# Altium footprint library Verdin Development Board.PcbLib: 154 footprints (part 8 of 10)
Each footprint in its own frame and in the unit in brackets; x right, y up, seen from the top. Pads: shape width x height; smd on the part's side, far side on the other; paste and mask are expansions set on the pad; w line width, h text height; cw(c..) or ccw(c..) is an arc to the next point about the centre after c.
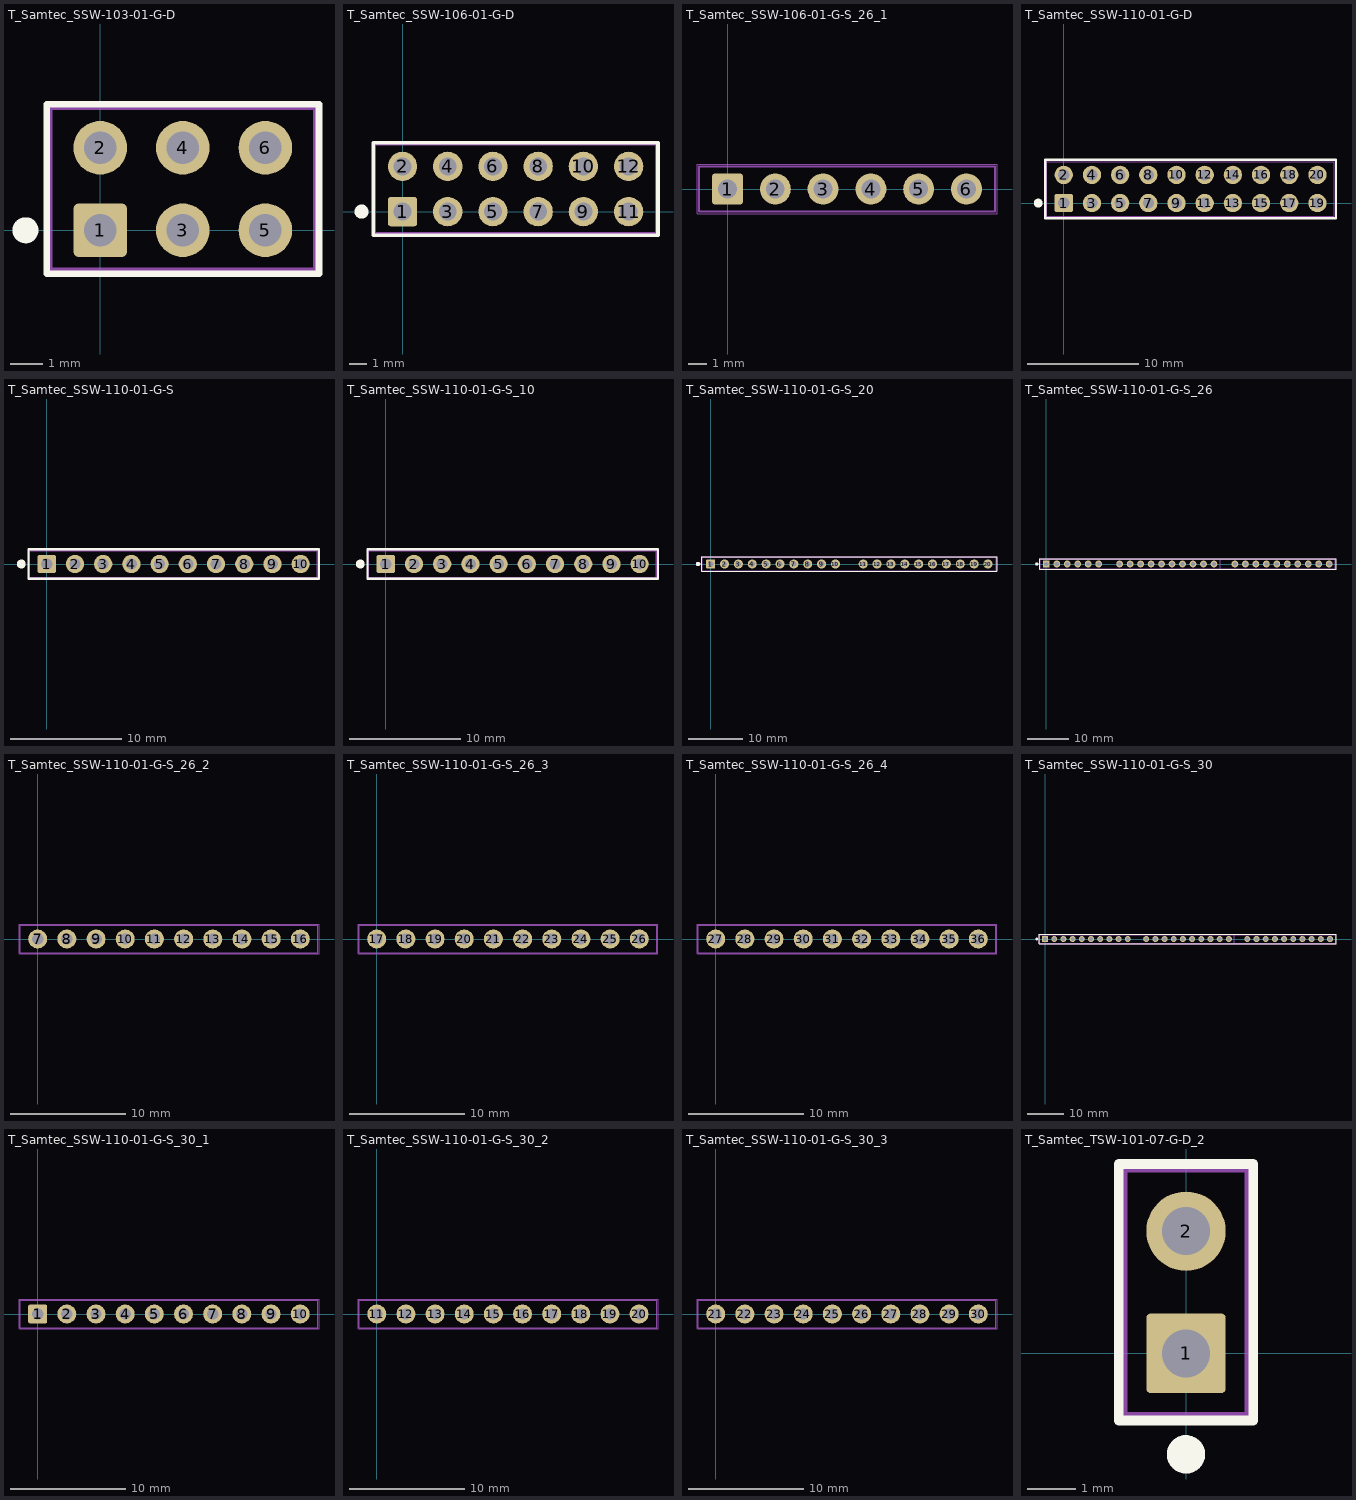
[diagram p7: the footprints below, top view; thin cyan lines are the x and y axes]

## T_Samtec_SSW-103-01-G-D [mm]
pads (6):
  rrect20% 1.65x1.65 hole 1: 1(0,0)
  round 1.65 hole 1: 2(0,2.54) 3(2.54,0) 4(2.54,2.54) 5(5.08,0) 6(5.08,2.54)
Top Overlay:
  circle w0.4: c-2.3,0 r0.2
  lines w0.2: -1.65,-1.33 6.73,-1.33 6.73,3.87 -1.65,3.87 -1.65,-1.33
Top Component Outline:
  lines w0.05: -1.625,-1.305 -1.625,3.845 6.705,3.845 6.705,-1.305 -1.625,-1.305
Top 3D Body:
  lines w0.001: -1.525,-1.205 -1.525,3.745 6.605,3.745 6.605,-1.205 -1.525,-1.205
Top Dimensions:
  lines w0.1: -1.525,-1.2 6.6,-1.2 6.6,3.75 -1.525,3.75 -1.525,-1.2
Top Component Center:
  circle w0.05: c0,0 r0.35
  lines w0.05: -0.5,0 0.5,0 ; 0,-0.5 0,0.5
Top Assembly:
  text ".Designator" at 0.875,4.225 h0.75
3D body "Samtec-SSW-103-01-G-D.step": height 8.52, standoff -2.63, extent -1.524,-1.206 6.604,3.747

## T_Samtec_SSW-106-01-G-D [mm]
pads (12):
  rrect20% 1.65x1.65 hole 1: 1(0,0)
  round 1.65 hole 1: 2(0,2.54) 3(2.54,0) 4(2.54,2.54) 5(5.08,0) 6(5.08,2.54) 7(7.62,0) 8(7.62,2.54) 9(10.16,0) 10(10.16,2.54) 11(12.7,0) 12(12.7,2.54)
Top Overlay:
  circle w0.4: c-2.3,0 r0.2
  lines w0.2: -1.65,-1.33 14.35,-1.33 14.35,3.87 -1.65,3.87 -1.65,-1.33
Top Component Outline:
  lines w0.05: -1.625,-1.305 -1.625,3.845 14.325,3.845 14.325,-1.305 -1.625,-1.305
Top 3D Body:
  lines w0.001: -1.525,-1.205 -1.525,3.745 14.225,3.745 14.225,-1.205 -1.525,-1.205
Top Dimensions:
  lines w0.1: -1.525,-1.2 -1.525,3.75 14.225,3.75 14.225,-1.2 -1.525,-1.2
Top Component Center:
  circle w0.05: c0,0 r0.35
  lines w0.05: -0.5,0 0.5,0 ; 0,-0.5 0,0.5
Top Assembly:
  text ".Designator" at 4.7,4.225 h0.75
3D body "Samtec-SSW-106-01-G-D.step": height 8.52, standoff -2.63, extent -1.524,-1.206 14.224,3.747

## T_Samtec_SSW-106-01-G-S_26_1 [mm]
pads (6):
  rrect20% 1.65x1.65 hole 1: 1(0,0)
  round 1.65 hole 1: 2(2.54,0) 3(5.08,0) 4(7.62,0) 5(10.16,0) 6(12.7,0)
Top Component Outline:
  lines w0.05: -1.625,-1.305 -1.625,1.305 14.326,1.305 14.326,-1.305 -1.625,-1.305
Top 3D Body:
  lines w0.001: -1.524,-1.206 -1.524,1.207 14.224,1.207 14.224,-1.206 -1.524,-1.206
Top Dimensions:
  lines w0.1: -1.525,-1.2 14.224,-1.2 14.224,1.2 -1.525,1.2 -1.525,-1.2
Top Component Center:
  circle w0.05: c0,0 r0.35
  lines w0.05: -0.5,0 0.5,0 ; 0,-0.5 0,0.5
Top Assembly:
  text ".Designator" at 5.08,1.905 h0.75
3D body "Samtec-SSW-106-01-G-S.step": height 8.52, standoff -2.63, extent -1.524,-1.206 14.224,1.207

## T_Samtec_SSW-110-01-G-D [mm]
pads (20):
  rrect20% 1.65x1.65 hole 1: 1(0,0)
  round 1.65 hole 1: 2(0,2.54) 3(2.54,0) 4(2.54,2.54) 5(5.08,0) 6(5.08,2.54) 7(7.62,0) 8(7.62,2.54) 9(10.16,0) 10(10.16,2.54) 11(12.7,0) 12(12.7,2.54) 13(15.24,0) 14(15.24,2.54) 15(17.78,0) 16(17.78,2.54) 17(20.32,0) 18(20.32,2.54) 19(22.86,0) 20(22.86,2.54)
Top Overlay:
  circle w0.4: c-2.3,0 r0.2
  lines w0.2: -1.675,-1.358 24.535,-1.358 24.535,3.897 -1.675,3.897 -1.675,-1.358
Top Component Outline:
  lines w0.05: -1.675,-1.358 -1.675,3.897 24.535,3.897 24.535,-1.358 -1.675,-1.358
Top 3D Body:
  lines w0.001: -1.524,-1.206 -1.524,3.747 24.384,3.747 24.384,-1.206 -1.524,-1.206
Top Dimensions:
  lines w0.1: -1.524,-1.206 -1.524,3.747 24.384,3.747 24.384,-1.206 -1.524,-1.206
Top Component Center:
  circle w0.05: c0,0 r0.35
  lines w0.05: -0.5,0 0.5,0 ; 0,-0.5 0,0.5
Top Assembly:
  text ".Designator" at 9.75,4.25 h0.75
3D body "Samtec-SSW-110-01-G-D.step": height 8.52, standoff -2.63, extent -1.524,-1.206 24.384,3.747

## T_Samtec_SSW-110-01-G-S [mm]
pads (10):
  rrect20% 1.65x1.65 hole 1: 1(0,0)
  round 1.65 hole 1: 2(2.54,0) 3(5.08,0) 4(7.62,0) 5(10.16,0) 6(12.7,0) 7(15.24,0) 8(17.78,0) 9(20.32,0) 10(22.86,0)
Top Overlay:
  circle w0.4: c-2.3,0 r0.2
  lines w0.2: -1.65,-1.33 24.511,-1.33 24.511,1.33 -1.65,1.33 -1.65,-1.33
Top Component Outline:
  lines w0.05: -1.625,-1.305 -1.625,1.305 24.511,1.305 24.511,-1.305 -1.625,-1.305
Top 3D Body:
  lines w0.001: -1.525,-1.205 -1.525,1.205 24.384,1.205 24.384,-1.205 -1.525,-1.205
Top Dimensions:
  lines w0.1: -1.525,-1.2 24.375,-1.2 24.375,1.2 -1.525,1.2 -1.525,-1.2
Top Component Center:
  circle w0.05: c0,0 r0.35
  lines w0.05: -0.5,0 0.5,0 ; 0,-0.5 0,0.5
Top Assembly:
  text ".Designator" at 9.8,1.675 h0.75
3D body "Samtec-SSW-110-01-G-P.step": height 8.52, standoff -2.63, extent -1.524,-1.206 24.384,1.207

## T_Samtec_SSW-110-01-G-S_10 [mm]
pads (10):
  rrect20% 1.65x1.65 hole 1: 1(0,0)
  round 1.65 hole 1: 2(2.54,0) 3(5.08,0) 4(7.62,0) 5(10.16,0) 6(12.7,0) 7(15.24,0) 8(17.78,0) 9(20.32,0) 10(22.86,0)
Top Overlay:
  circle w0.4: c-2.3,0 r0.2
  lines w0.2: -1.65,-1.33 24.511,-1.33 24.511,1.33 -1.65,1.33 -1.65,-1.33
Top Component Outline:
  lines w0.05: -1.625,-1.305 -1.625,1.305 24.511,1.305 24.511,-1.305 -1.625,-1.305
Top 3D Body:
  lines w0.001: -1.525,-1.205 -1.525,1.205 24.384,1.205 24.384,-1.205 -1.525,-1.205
Top Dimensions:
  lines w0.1: -1.525,-1.2 24.375,-1.2 24.375,1.2 -1.525,1.2 -1.525,-1.2
Top Component Center:
  circle w0.05: c0,0 r0.35
  lines w0.05: -0.5,0 0.5,0 ; 0,-0.5 0,0.5
Top Assembly:
  text ".Designator" at 9.8,1.675 h0.75
3D body "Samtec-SSW-110-01-G-P.step": height 8.52, standoff -2.63, extent -1.524,-1.206 24.384,1.207

## T_Samtec_SSW-110-01-G-S_20 [mm]
pads (20):
  rrect20% 1.65x1.65 hole 1: 1(0,0)
  round 1.65 hole 1: 2(2.54,0) 3(5.08,0) 4(7.62,0) 5(10.16,0) 6(12.7,0) 7(15.24,0) 8(17.78,0) 9(20.32,0) 10(22.86,0) 11(27.94,0) 12(30.48,0) 13(33.02,0) 14(35.56,0) 15(38.1,0) 16(40.64,0) 17(43.18,0) 18(45.72,0) 19(48.26,0) 20(50.8,0)
Top Overlay:
  circle w0.4: c-2.3,0 r0.2
  lines w0.2: -1.65,-1.33 -1.65,1.33 52.45,1.33 52.45,-1.33 -1.65,-1.33
Top Component Outline:
  lines w0.05: -1.625,-1.305 52.425,-1.305 52.425,1.305 -1.625,1.305 -1.625,-1.305
Top 3D Body:
  lines w0.001: -1.525,-1.205 52.325,-1.205 52.325,1.205 -1.525,1.205 -1.525,-1.205
Top Dimensions:
  lines w0.1: -1.525,-1.2 -1.525,1.2 52.325,1.2 52.325,-1.2 -1.525,-1.2
Top Component Center:
  circle w0.05: c0,0 r0.35
  lines w0.05: -0.5,0 0.5,0 ; 0,-0.5 0,0.5
Top Assembly:
  text ".Designator" at 23.7,1.675 h0.75
3D body "Samtec-SSW-110-01-G-P.step": height 8.52, standoff -2.63, extent 26.416,-1.206 52.324,1.207
3D body "Samtec-SSW-110-01-G-P.step": height 8.52, standoff -2.63, extent -1.524,-1.206 24.384,1.207

## T_Samtec_SSW-110-01-G-S_26 [mm]
pads (26):
  rrect20% 1.65x1.65 hole 1: 1(0,0)
  round 1.65 hole 1: 2(2.54,0) 3(5.08,0) 4(7.62,0) 5(10.16,0) 6(12.7,0) 7(17.78,0) 8(20.32,0) 9(22.86,0) 10(25.4,0) 11(27.94,0) 12(30.48,0) 13(33.02,0) 14(35.56,0) 15(38.1,0) 16(40.64,0) 17(45.72,0) 18(48.26,0) 19(50.8,0) 20(53.34,0) 21(55.88,0) 22(58.42,0) 23(60.96,0) 24(63.5,0) 25(66.04,0) 26(68.58,0)
Top Overlay:
  circle w0.4: c-2.3,0 r0.2
  lines w0.2: -1.65,-1.33 -1.65,1.33 70.231,1.33 70.231,-1.33 -1.65,-1.33
Top Component Outline:
  lines w0.05: -1.625,-1.305 70.206,-1.305 70.206,1.305 -1.625,1.305 -1.625,-1.305
Top 3D Body:
  lines w0.001: 42.165,-1.205 42.165,1.205 ; 52.325,-1.205 -1.525,-1.205 -1.525,1.205 52.325,1.205 ; 70.105,-1.205 70.105,1.205
Top Dimensions:
  lines w0.1: -1.525,-1.2 -1.525,1.2 70.104,1.2 70.104,-1.2 -1.525,-1.2
Top Component Center:
  circle w0.05: c0,0 r0.35
  lines w0.05: -0.5,0 0.5,0 ; 0,-0.5 0,0.5
Top Assembly:
  text ".Designator" at 27.534,1.778 h0.75
3D body "Samtec-SSW-106-01-G-S.step": height 8.52, standoff -2.63, extent -1.524,-1.206 14.224,1.207
3D body "Samtec-SSW-110-01-G-P.step": height 8.52, standoff -2.63, extent 44.196,-1.206 70.104,1.207
3D body "Samtec-SSW-110-01-G-P.step": height 8.52, standoff -2.63, extent 16.256,-1.206 42.164,1.207

## T_Samtec_SSW-110-01-G-S_26_2 [mm]
pads (10):
  round 1.65 hole 1: 7(0,0) 8(2.54,0) 9(5.08,0) 10(7.62,0) 11(10.16,0) 12(12.7,0) 13(15.24,0) 14(17.78,0) 15(20.32,0) 16(22.86,0)
Top Component Outline:
  lines w0.05: -1.626,-1.305 -1.626,1.305 24.486,1.305 24.486,-1.305 -1.626,-1.305
Top 3D Body:
  lines w0.001: 24.384,-1.205 -1.524,-1.205 -1.524,1.205 24.384,1.205 ; 24.385,-1.205 24.385,1.205
Top Dimensions:
  lines w0.1: -1.524,-1.2 24.384,-1.2 24.384,1.2 -1.524,1.2 -1.524,-1.2
Top Component Center:
  circle w0.05: c0,0 r0.35
  lines w0.05: -0.5,0 0.5,0 ; 0,-0.5 0,0.5
Top Assembly:
  text ".Designator" at 9.754,1.778 h0.75
3D body "Samtec-SSW-110-01-G-P.step": height 8.52, standoff -2.63, extent -1.524,-1.206 24.384,1.207

## T_Samtec_SSW-110-01-G-S_26_3 [mm]
pads (10):
  round 1.65 hole 1: 17(0,0) 18(2.54,0) 19(5.08,0) 20(7.62,0) 21(10.16,0) 22(12.7,0) 23(15.24,0) 24(17.78,0) 25(20.32,0) 26(22.86,0)
Top Component Outline:
  lines w0.05: -1.625,-1.305 -1.625,1.305 24.486,1.305 24.486,-1.305 -1.625,-1.305
Top 3D Body:
  lines w0.001: 24.384,1.205 -1.525,1.205 -1.525,-1.205 24.385,-1.205 24.385,1.205
Top Dimensions:
  lines w0.1: -1.525,-1.2 24.384,-1.2 24.384,1.2 -1.525,1.2 -1.525,-1.2
Top Component Center:
  circle w0.05: c0,0 r0.35
  lines w0.05: -0.5,0 0.5,0 ; 0,-0.5 0,0.5
Top Assembly:
  text ".Designator" at 10.16,1.905 h0.75
3D body "Samtec-SSW-110-01-G-P.step": height 8.52, standoff -2.63, extent -1.524,-1.206 24.384,1.207

## T_Samtec_SSW-110-01-G-S_26_4 [mm]
pads (10):
  round 1.65 hole 1: 27(0,0) 28(2.54,0) 29(5.08,0) 30(7.62,0) 31(10.16,0) 32(12.7,0) 33(15.24,0) 34(17.78,0) 35(20.32,0) 36(22.86,0)
Top Component Outline:
  lines w0.05: -1.625,-1.305 -1.625,1.305 24.486,1.305 24.486,-1.305 -1.625,-1.305
Top 3D Body:
  lines w0.001: 24.384,1.205 -1.525,1.205 -1.525,-1.205 24.385,-1.205 24.385,1.205
Top Dimensions:
  lines w0.1: -1.525,-1.2 24.384,-1.2 24.384,1.2 -1.525,1.2 -1.525,-1.2
Top Component Center:
  circle w0.05: c0,0 r0.35
  lines w0.05: -0.5,0 0.5,0 ; 0,-0.5 0,0.5
Top Assembly:
  text ".Designator" at 10.16,1.905 h0.75
3D body "Samtec-SSW-110-01-G-P.step": height 8.52, standoff -2.63, extent -1.524,-1.206 24.384,1.207

## T_Samtec_SSW-110-01-G-S_30 [mm]
pads (30):
  rrect20% 1.65x1.65 hole 1: 1(0,0)
  round 1.65 hole 1: 2(2.54,0) 3(5.08,0) 4(7.62,0) 5(10.16,0) 6(12.7,0) 7(15.24,0) 8(17.78,0) 9(20.32,0) 10(22.86,0) 11(27.94,0) 12(30.48,0) 13(33.02,0) 14(35.56,0) 15(38.1,0) 16(40.64,0) 17(43.18,0) 18(45.72,0) 19(48.26,0) 20(50.8,0) 21(55.88,0) 22(58.42,0) 23(60.96,0) 24(63.5,0) 25(66.04,0) 26(68.58,0) 27(71.12,0) 28(73.66,0) 29(76.2,0) 30(78.74,0)
Top Overlay:
  circle w0.4: c-2.3,0 r0.2
  lines w0.2: -1.65,-1.33 80.391,-1.33 80.391,1.33 -1.65,1.33 -1.65,-1.33
Top Component Outline:
  lines w0.05: -1.625,-1.305 -1.625,1.305 80.366,1.305 80.366,-1.305 -1.625,-1.305
Top 3D Body:
  lines w0.001: 80.265,-1.205 80.265,1.205 ; -1.525,-1.205 -1.525,1.205 52.325,1.205 52.325,-1.205 -1.525,-1.205
Top Dimensions:
  lines w0.1: -1.525,-1.2 80.264,-1.2 80.264,1.2 -1.525,1.2 -1.525,-1.2
Top Component Center:
  circle w0.05: c0,0 r0.35
  lines w0.05: -0.5,0 0.5,0 ; 0,-0.5 0,0.5
Top Assembly:
  text ".Designator" at 38.938,1.778 h0.75
3D body "Samtec-SSW-110-01-G-P.step": height 8.52, standoff -2.63, extent -1.524,-1.206 24.384,1.207
3D body "Samtec-SSW-110-01-G-P.step": height 8.52, standoff -2.63, extent 26.416,-1.206 52.324,1.207
3D body "Samtec-SSW-110-01-G-P.step": height 8.52, standoff -2.63, extent 54.356,-1.206 80.264,1.207

## T_Samtec_SSW-110-01-G-S_30_1 [mm]
pads (10):
  rrect20% 1.65x1.65 hole 1: 1(0,0)
  round 1.65 hole 1: 2(2.54,0) 3(5.08,0) 4(7.62,0) 5(10.16,0) 6(12.7,0) 7(15.24,0) 8(17.78,0) 9(20.32,0) 10(22.86,0)
Top Component Outline:
  lines w0.05: -1.625,-1.305 24.5,-1.305 24.5,1.305 -1.625,1.305 -1.625,-1.305
Top 3D Body:
  lines w0.001: -1.525,-1.205 24.384,-1.205 24.384,1.205 -1.525,1.205 -1.525,-1.205
Top Dimensions:
  lines w0.1: -1.525,-1.2 -1.525,1.2 24.384,1.2 24.384,-1.2 -1.525,-1.2
Top Component Center:
  circle w0.05: c0,0 r0.35
  lines w0.05: -0.5,0 0.5,0 ; 0,-0.5 0,0.5
Top Assembly:
  text ".Designator" at 9.7,1.7 h0.75
3D body "Samtec-SSW-110-01-G-P.step": height 8.52, standoff -2.63, extent -1.524,-1.206 24.384,1.207

## T_Samtec_SSW-110-01-G-S_30_2 [mm]
pads (10):
  round 1.65 hole 1: 11(0,0) 12(2.54,0) 13(5.08,0) 14(7.62,0) 15(10.16,0) 16(12.7,0) 17(15.24,0) 18(17.78,0) 19(20.32,0) 20(22.86,0)
Top Component Outline:
  lines w0.05: -1.64,-1.305 -1.64,1.305 24.51,1.305 24.51,-1.305 -1.64,-1.305
Top 3D Body:
  lines w0.001: -1.524,-1.205 -1.524,1.205 24.385,1.205 24.385,-1.205 -1.524,-1.205
Top Dimensions:
  lines w0.1: -1.524,-1.2 24.384,-1.2 24.384,1.2 -1.524,1.2 -1.524,-1.2
Top Component Center:
  circle w0.05: c0,0 r0.35
  lines w0.05: -0.5,0 0.5,0 ; 0,-0.5 0,0.5
Top Assembly:
  text ".Designator" at 9.728,1.778 h0.75
3D body "Samtec-SSW-110-01-G-P.step": height 8.52, standoff -2.63, extent -1.524,-1.206 24.384,1.207

## T_Samtec_SSW-110-01-G-S_30_3 [mm]
pads (10):
  round 1.65 hole 1: 21(0,0) 22(2.54,0) 23(5.08,0) 24(7.62,0) 25(10.16,0) 26(12.7,0) 27(15.24,0) 28(17.78,0) 29(20.32,0) 30(22.86,0)
Top Component Outline:
  lines w0.05: -1.626,-1.305 -1.626,1.305 24.486,1.305 24.486,-1.305 -1.626,-1.305
Top 3D Body:
  lines w0.001: 24.385,-1.205 24.385,1.205 ; 24.385,-1.205 -1.524,-1.205 -1.524,1.205 24.385,1.205 ; 24.385,-1.205 24.385,1.205
Top Dimensions:
  lines w0.1: -1.524,-1.2 24.384,-1.2 24.384,1.2 -1.524,1.2 -1.524,-1.2
Top Component Center:
  circle w0.05: c0,0 r0.35
  lines w0.05: -0.5,0 0.5,0 ; 0,-0.5 0,0.5
Top Assembly:
  text ".Designator" at 9.62,1.5 h0.75
3D body "Samtec-SSW-110-01-G-P.step": height 8.52, standoff -2.63, extent -1.524,-1.206 24.384,1.207

## T_Samtec_TSW-101-07-G-D_2 [mm]
pads (2):
  rrect10% 1.65x1.65 hole 1: 1(0,0)
  round 1.65 hole 1: 2(0,2.54)
Top Overlay:
  circle w0.4: c0,-2.1 r0.2
  lines w0.2: -1.395,-1.395 -1.395,3.935 1.395,3.935 1.395,-1.395 -1.395,-1.395
Top Component Outline:
  lines w0.05: -1.37,-1.37 1.37,-1.37 1.37,3.91 -1.37,3.91 -1.37,-1.37
Top 3D Body:
  lines w0.001: -1.27,-1.27 -1.27,3.81 1.27,3.81 1.27,-1.27 -1.27,-1.27
Top Dimensions:
  lines w0.1: -1.27,-1.27 1.27,-1.27 1.27,3.81 -1.27,3.81 -1.27,-1.27
Top Component Center:
  circle w0.05: c0,0 r0.35
  lines w0.05: -0.5,0 0.5,0 ; 0,-0.5 0,0.5
Top Assembly:
  text ".Designator" at 2.1,-0.3 h0.75
3D body "Samtec-TSW-101-07-G-D.step": height 8.4, standoff -2.52, extent -1.27,-1.27 1.27,3.81